# Altium footprint library Resistor.PcbLib: 2 footprints
Each footprint in its own frame and in the unit in brackets; x right, y up, seen from the top. Pads: shape width x height; smd on the part's side, far side on the other; paste and mask are expansions set on the pad; w line width, h text height; cw(c..) or ccw(c..) is an arc to the next point about the centre after c.
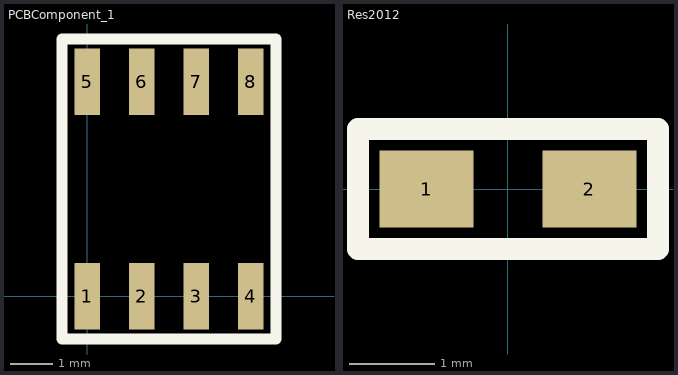
[diagram p0: the footprints below, top view; thin cyan lines are the x and y axes]

## PCBComponent_1 [mm]
pads (8):
  rect 0.6x1.55 smd: 1(0,0) 2(1.27,0) 3(2.54,0) 4(3.81,0) 5(0,5) 6(1.27,5) 7(2.54,5) 8(3.81,5)
Top Overlay:
  lines w0.254: -0.595,-1 4.405,-1 4.405,6 -0.595,6 -0.595,-1

## Res2012 [mm]
pads (2):
  rect 1.1x0.9 smd: 1(-0.95,0) 2(0.95,0)
Top Overlay:
  lines w0.254: -1.75,-0.7 -1.75,0.7 1.75,0.7 1.75,-0.7 -1.75,-0.7